# Altium footprint library UCC21550BDWKR.PcbLib: 1 footprints
Each footprint in its own frame and in the unit in brackets; x right, y up, seen from the top. Pads: shape width x height; smd on the part's side, far side on the other; paste and mask are expansions set on the pad; w line width, h text height; cw(c..) or ccw(c..) is an arc to the next point about the centre after c.
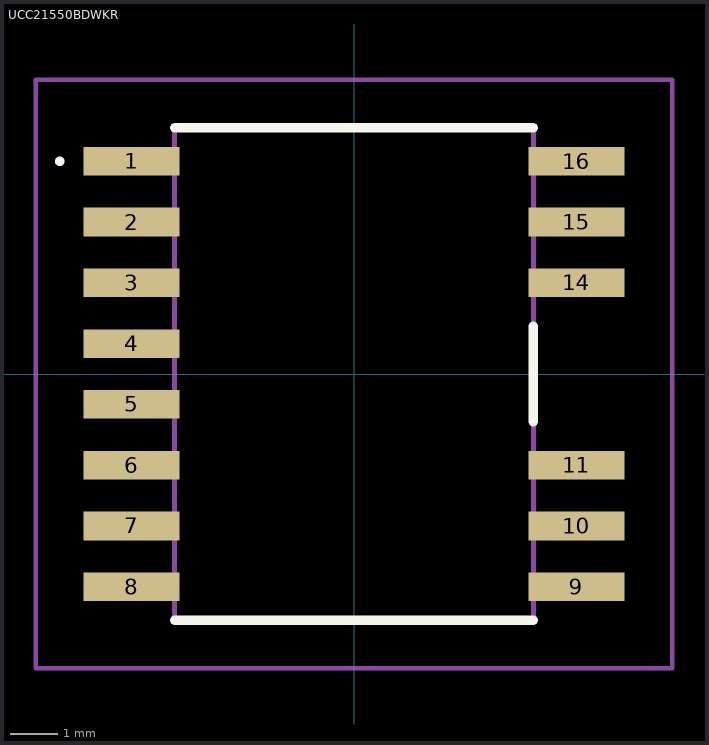
[diagram p0: the footprint, top view; thin cyan lines are the x and y axes]

## UCC21550BDWKR [mm]
pads (14):
  rect 2x0.6 smd: 1(-4.65,4.445) 2(-4.65,3.175) 3(-4.65,1.905) 4(-4.65,0.635) 5(-4.65,-0.635) 6(-4.65,-1.905) 7(-4.65,-3.175) 8(-4.65,-4.445) 9(4.65,-4.445) 10(4.65,-3.175) 11(4.65,-1.905) 14(4.65,1.905) 15(4.65,3.175) 16(4.65,4.445)
Top Overlay:
  lines w0.1: -6.2,4.445 -6.2,4.445 ; -6.2,4.445 ccw(c-6.15,4.445) -6.1,4.445 ; -6.2,4.445 cw(c-6.15,4.445) -6.1,4.445 ; -6.1,4.445 -6.1,4.445
  lines w0.2: -3.75,-5.15 3.75,-5.15 ; -3.75,5.15 3.75,5.15 ; 3.75,-1 3.75,1
Mechanical 15:
  lines w0.1: -3.75,-5.15 3.75,-5.15 3.75,5.15 -3.75,5.15 -3.75,-5.15
Mechanical 20:
  lines w0.1: -6.65,-6.15 6.65,-6.15 6.65,6.15 -6.65,6.15 -6.65,-6.15